# Altium footprint library Wuerth_Coil.PcbLib: 1 footprints
Each footprint in its own frame and in the unit in brackets; x right, y up, seen from the top. Pads: shape width x height; smd on the part's side, far side on the other; paste and mask are expansions set on the pad; w line width, h text height; cw(c..) or ccw(c..) is an arc to the next point about the centre after c.
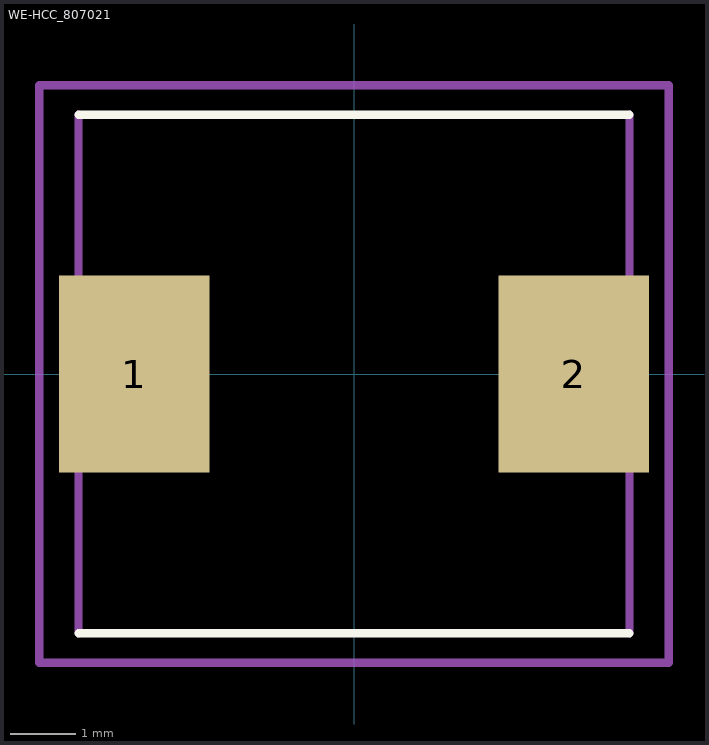
[diagram p0: the footprint, top view; thin cyan lines are the x and y axes]

## WE-HCC_807021 [mm]
pads (2):
  rect 2.3x3 smd: 1(-3.35,0) 2(3.35,0)
Top Overlay:
  lines w0.127: -4.2,-3.95 4.2,-3.95 ; -4.2,3.95 4.2,3.95
Mechanical 13:
  lines w0.127: -4.2,-3.95 -4.2,3.95 ; 4.2,-3.95 4.2,3.95
Mechanical 15:
  lines w0.127: -4.8,-4.4 4.8,-4.4 4.8,4.4 -4.8,4.4 -4.8,-4.4
3D body "7443340220.stp": height 7.15, standoff -0.05, extent -4.2,-3.95 4.2,3.95